# Altium schematic symbol library 2021-01-24_13-35-38.SchLib: 2 symbols
Pins are listed as number, name and electrical type; pins without a type are passive.

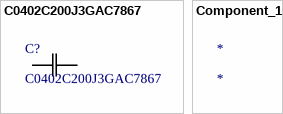
[diagram p0: symbols C0402C200J3GAC7867 to Component_1]

## C0402C200J3GAC7867
designator C?
No Description Available; Vendor: Kemet; SourceLibrary: Kemet_2020-03-25_2b; Built_By: EMA_Frank; Source_Library: Kemet_2020-03-25_2.xlr; Type: DEV; Manufacturer_Part_Number: C0402C200J3GAC7867; Copyright: Copyright (C) 2018 Accelerated Designs. All rights reserved; RefDes: RefDes
footprint CAPC10555_55N_KEM
pins: 1, 2

## Component_1
designator *